# Altium footprint library WR-FPC_0.50mm.PcbLib: 147 footprints (part 1 of 10)
Each footprint in its own frame and in the unit in brackets; x right, y up, seen from the top. Pads: shape width x height; smd on the part's side, far side on the other; paste and mask are expansions set on the pad; w line width, h text height; cw(c..) or ccw(c..) is an arc to the next point about the centre after c.
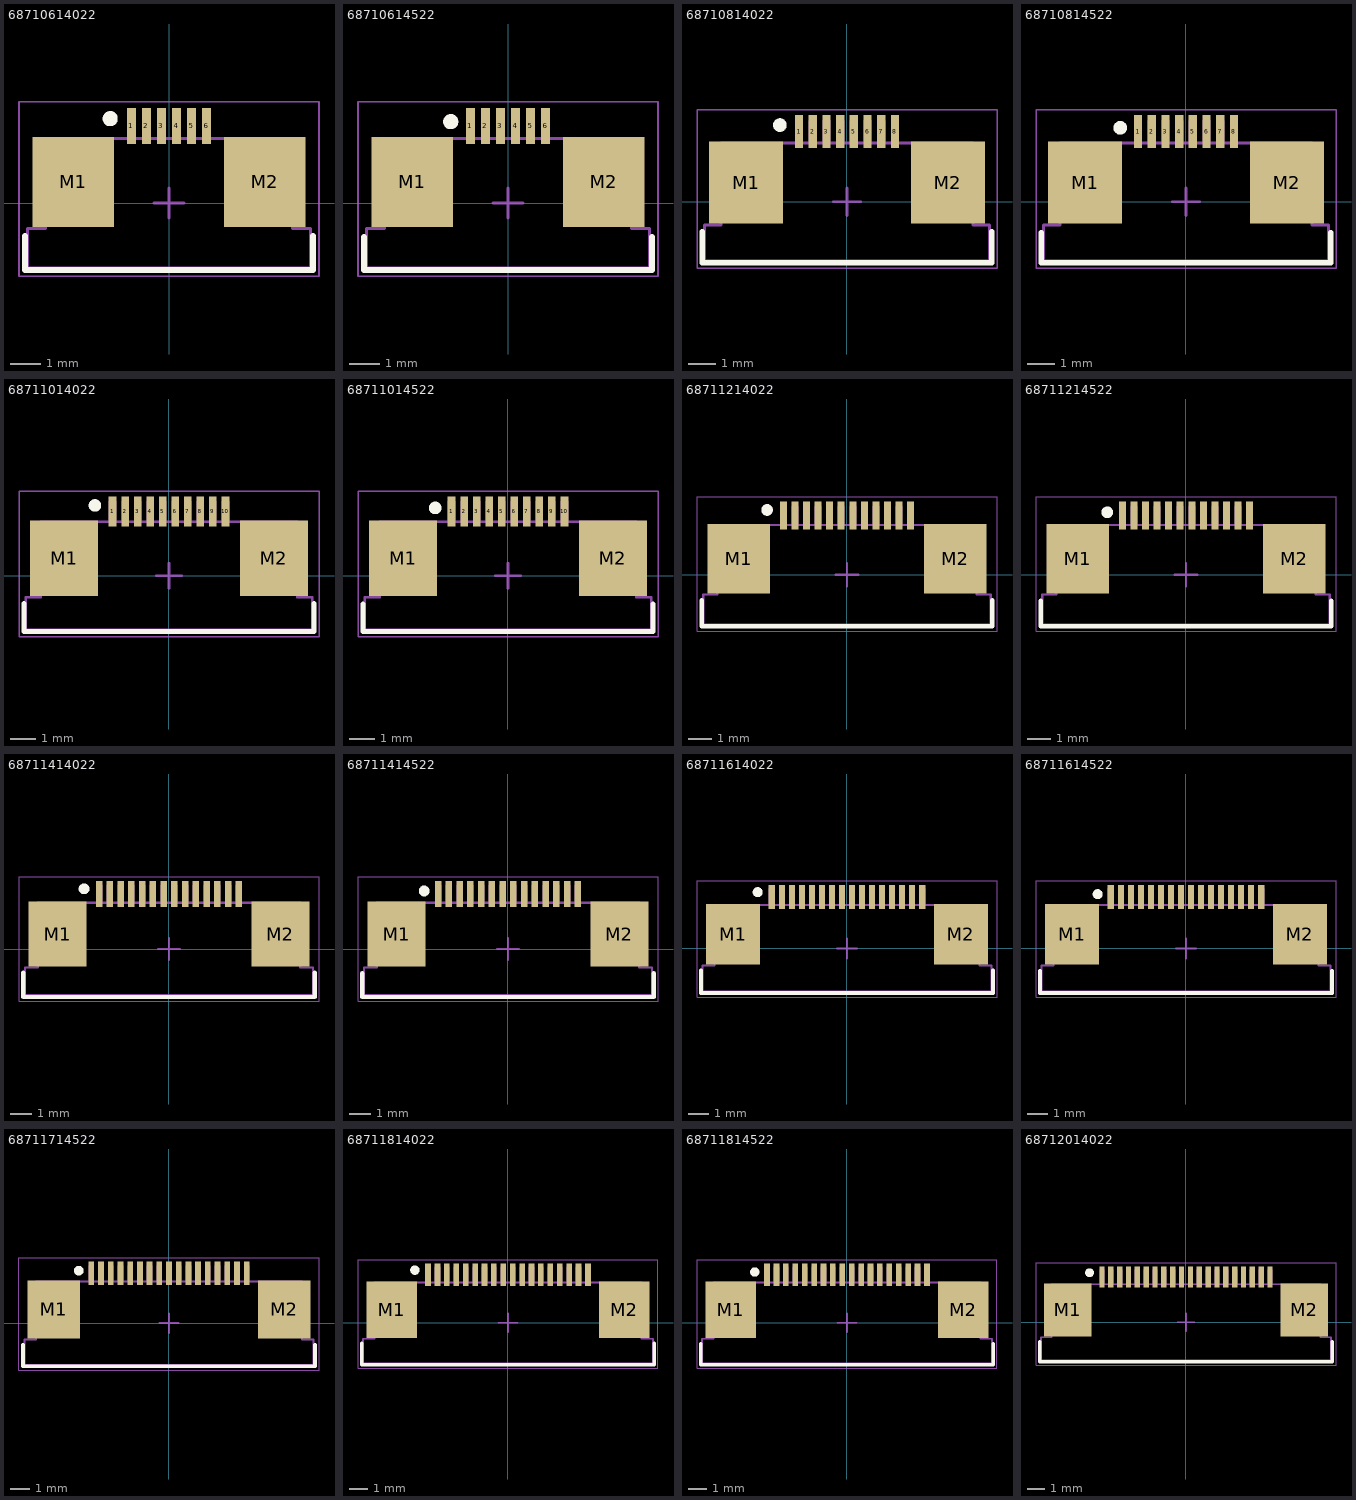
[diagram p0: the footprints below, top view; thin cyan lines are the x and y axes]

## 68710614022 [mm] "ZIF Connectors, Horizontal, Top Contact, pitch 0.5mm, 6p"
height 2.25
pads (8):
  rect 0.3x1.2 smd: 1(-1.25,2.56) 2(-0.75,2.56) 3(-0.25,2.56) 4(0.25,2.56) 5(0.75,2.56) 6(1.25,2.56)
  rect 2.7x3 smd: M1(-3.18,0.7) M2(3.18,0.7)
Top Overlay:
  circle w0.25: c-1.95,2.8 r0.125
  lines w0.2: -4.775,-1.1 -4.775,-2.225 4.775,-2.225 4.775,-1.1
Top Assembly:
  lines w0.1: -1.35,2.15 -1.35,2.95 -1.15,2.95 -1.15,2.15 ; -0.85,2.15 -0.85,2.95 -0.65,2.95 -0.65,2.15 ; -0.35,2.15 -0.35,2.95 -0.15,2.95 -0.15,2.15 ; 0.15,2.15 0.15,2.95 0.35,2.95 0.35,2.15 ; 0.65,2.15 0.65,2.95 0.85,2.95 0.85,2.15 ; 1.15,2.15 1.15,2.95 1.35,2.95 1.35,2.15 ; -4.7,-2.15 4.7,-2.15 4.7,-0.85 4.1,-0.85 4.1,2.15 -4.1,2.15 -4.1,-0.85 -4.7,-0.85 -4.7,-2.15
Top Designator:
  text ".Designator" at -3.647,-0.357 h1
Top 3D Body:
  lines w0.1: -1.35,2.15 -1.35,2.95 -1.15,2.95 -1.15,2.15 ; -0.85,2.15 -0.85,2.95 -0.65,2.95 -0.65,2.15 ; -0.35,2.15 -0.35,2.95 -0.15,2.95 -0.15,2.15 ; 0.15,2.15 0.15,2.95 0.35,2.95 0.35,2.15 ; 0.65,2.15 0.65,2.95 0.85,2.95 0.85,2.15 ; 1.15,2.15 1.15,2.95 1.35,2.95 1.35,2.15 ; -4.7,-2.15 -4.7,-0.85 -4.1,-0.85 -4.1,2.15 4.1,2.15 4.1,-0.85 4.7,-0.85 4.7,-2.15 -4.7,-2.15
Top Courtyard:
  lines w0.05: -4.975,-2.425 4.975,-2.425 4.975,3.36 -4.975,3.36 -4.975,-2.425
Top Component Center:
  lines w0.1: -0.5,0 0.5,0 ; 0,-0.5 0,0.5
3D body "68710614022.stp": height 2.1, standoff 0, extent -4.7,-2.15 4.7,2.95

## 68710614522 [mm] "ZIF Connectors, Horizontal, Bottom Contact, pitch 0.5mm, 6p"
height 2.25
pads (8):
  rect 0.3x1.2 smd: 1(-1.25,2.56) 2(-0.75,2.56) 3(-0.25,2.56) 4(0.25,2.56) 5(0.75,2.56) 6(1.25,2.56)
  rect 2.7x3 smd: M1(-3.18,0.7) M2(3.18,0.7)
Top Overlay:
  circle w0.25: c-1.9,2.7 r0.125
  lines w0.2: -4.775,-1.125 -4.775,-2.225 4.775,-2.225 4.775,-1.125
Top Assembly:
  lines w0.1: -1.35,2.15 -1.35,2.95 -1.15,2.95 -1.15,2.15 ; -0.85,2.15 -0.85,2.95 -0.65,2.95 -0.65,2.15 ; -0.35,2.15 -0.35,2.95 -0.15,2.95 -0.15,2.15 ; 0.15,2.15 0.15,2.95 0.35,2.95 0.35,2.15 ; 0.65,2.15 0.65,2.95 0.85,2.95 0.85,2.15 ; 1.15,2.15 1.15,2.95 1.35,2.95 1.35,2.15 ; -4.7,-2.15 -4.7,-0.85 -4.1,-0.85 -4.1,2.15 4.1,2.15 4.1,-0.85 4.7,-0.85 4.7,-2.15 -4.7,-2.15
Top Designator:
  text ".Designator" at -3.647,-0.357 h1
Top 3D Body:
  lines w0.1: -1.35,2.15 -1.35,2.95 -1.15,2.95 -1.15,2.15 ; -0.85,2.15 -0.85,2.95 -0.65,2.95 -0.65,2.15 ; -0.35,2.15 -0.35,2.95 -0.15,2.95 -0.15,2.15 ; 0.15,2.15 0.15,2.95 0.35,2.95 0.35,2.15 ; 0.65,2.15 0.65,2.95 0.85,2.95 0.85,2.15 ; 1.15,2.15 1.15,2.95 1.35,2.95 1.35,2.15 ; -4.7,-2.15 4.7,-2.15 4.7,-0.85 4.1,-0.85 4.1,2.15 -4.1,2.15 -4.1,-0.85 -4.7,-0.85 -4.7,-2.15
Top Courtyard:
  lines w0.05: -4.975,-2.425 4.975,-2.425 4.975,3.36 -4.975,3.36 -4.975,-2.425
Top Component Center:
  lines w0.1: -0.5,0 0.5,0 ; 0,-0.5 0,0.5
3D body "68710614522.stp": height 2.1, standoff 0, extent -4.7,-2.15 4.7,2.95

## 68710814022 [mm] "ZIF Connectors, Horizontal, Top Contact, pitch 0.5mm, 8p"
height 2.25
pads (10):
  rect 0.3x1.2 smd: 1(-1.75,2.56) 2(-1.25,2.56) 3(-0.75,2.56) 4(-0.25,2.56) 5(0.25,2.56) 6(0.75,2.56) 7(1.25,2.56) 8(1.75,2.56)
  rect 2.7x3 smd: M1(-3.68,0.7) M2(3.68,0.7)
Top Overlay:
  circle w0.25: c-2.45,2.8 r0.125
  lines w0.2: -5.275,-1.1 -5.275,-2.225 5.275,-2.225 5.275,-1.1
Top Assembly:
  lines w0.1: -1.85,2.15 -1.85,2.95 -1.65,2.95 -1.65,2.15 ; -1.35,2.15 -1.35,2.95 -1.15,2.95 -1.15,2.15 ; -0.85,2.15 -0.85,2.95 -0.65,2.95 -0.65,2.15 ; -0.35,2.15 -0.35,2.95 -0.15,2.95 -0.15,2.15 ; 0.15,2.15 0.15,2.95 0.35,2.95 0.35,2.15 ; 0.65,2.15 0.65,2.95 0.85,2.95 0.85,2.15 ; 1.15,2.15 1.15,2.95 1.35,2.95 1.35,2.15 ; 1.65,2.15 1.65,2.95 1.85,2.95 1.85,2.15 ; -5.2,-2.15 5.2,-2.15 5.2,-0.85 4.6,-0.85 4.6,2.15 -4.6,2.15 -4.6,-0.85 -5.2,-0.85 -5.2,-2.15
Top Designator:
  text ".Designator" at -3.647,-0.357 h1
Top 3D Body:
  lines w0.1: -1.85,2.15 -1.85,2.95 -1.65,2.95 -1.65,2.15 ; -1.35,2.15 -1.35,2.95 -1.15,2.95 -1.15,2.15 ; -0.85,2.15 -0.85,2.95 -0.65,2.95 -0.65,2.15 ; -0.35,2.15 -0.35,2.95 -0.15,2.95 -0.15,2.15 ; 0.15,2.15 0.15,2.95 0.35,2.95 0.35,2.15 ; 0.65,2.15 0.65,2.95 0.85,2.95 0.85,2.15 ; 1.15,2.15 1.15,2.95 1.35,2.95 1.35,2.15 ; 1.65,2.15 1.65,2.95 1.85,2.95 1.85,2.15 ; -5.2,-2.15 -5.2,-0.85 -4.6,-0.85 -4.6,2.15 4.6,2.15 4.6,-0.85 5.2,-0.85 5.2,-2.15 -5.2,-2.15
Top Courtyard:
  lines w0.05: -5.475,-2.425 5.475,-2.425 5.475,3.36 -5.475,3.36 -5.475,-2.425
Top Component Center:
  lines w0.1: -0.5,0 0.5,0 ; 0,-0.5 0,0.5
3D body "68710814022.stp": height 2.1, standoff 0, extent -5.2,-2.15 5.2,2.95

## 68710814522 [mm] "ZIF Connectors, Horizontal, Bottom Contact, pitch 0.5mm, 8p"
height 2.25
pads (10):
  rect 0.3x1.2 smd: 1(-1.75,2.56) 2(-1.25,2.56) 3(-0.75,2.56) 4(-0.25,2.56) 5(0.25,2.56) 6(0.75,2.56) 7(1.25,2.56) 8(1.75,2.56)
  rect 2.7x3 smd: M1(-3.68,0.7) M2(3.68,0.7)
Top Overlay:
  circle w0.25: c-2.4,2.7 r0.125
  lines w0.2: -5.275,-1.125 -5.275,-2.225 5.275,-2.225 5.275,-1.125
Top Assembly:
  lines w0.1: -1.85,2.15 -1.85,2.95 -1.65,2.95 -1.65,2.15 ; -1.35,2.15 -1.35,2.95 -1.15,2.95 -1.15,2.15 ; -0.85,2.15 -0.85,2.95 -0.65,2.95 -0.65,2.15 ; -0.35,2.15 -0.35,2.95 -0.15,2.95 -0.15,2.15 ; 0.15,2.15 0.15,2.95 0.35,2.95 0.35,2.15 ; 0.65,2.15 0.65,2.95 0.85,2.95 0.85,2.15 ; 1.15,2.15 1.15,2.95 1.35,2.95 1.35,2.15 ; 1.65,2.15 1.65,2.95 1.85,2.95 1.85,2.15 ; -5.2,-2.15 -5.2,-0.85 -4.6,-0.85 -4.6,2.15 4.6,2.15 4.6,-0.85 5.2,-0.85 5.2,-2.15 -5.2,-2.15
Top Designator:
  text ".Designator" at -3.647,-0.357 h1
Top 3D Body:
  lines w0.1: -1.85,2.15 -1.85,2.95 -1.65,2.95 -1.65,2.15 ; -1.35,2.15 -1.35,2.95 -1.15,2.95 -1.15,2.15 ; -0.85,2.15 -0.85,2.95 -0.65,2.95 -0.65,2.15 ; -0.35,2.15 -0.35,2.95 -0.15,2.95 -0.15,2.15 ; 0.15,2.15 0.15,2.95 0.35,2.95 0.35,2.15 ; 0.65,2.15 0.65,2.95 0.85,2.95 0.85,2.15 ; 1.15,2.15 1.15,2.95 1.35,2.95 1.35,2.15 ; 1.65,2.15 1.65,2.95 1.85,2.95 1.85,2.15 ; -5.2,-2.15 5.2,-2.15 5.2,-0.85 4.6,-0.85 4.6,2.15 -4.6,2.15 -4.6,-0.85 -5.2,-0.85 -5.2,-2.15
Top Courtyard:
  lines w0.05: -5.475,-2.425 5.475,-2.425 5.475,3.36 -5.475,3.36 -5.475,-2.425
Top Component Center:
  lines w0.1: -0.5,0 0.5,0 ; 0,-0.5 0,0.5
3D body "68710814522.stp": height 2.1, standoff 0, extent -5.2,-2.15 5.2,2.95

## 68711014022 [mm] "ZIF Connectors, Horizontal, Top Contact, pitch 0.5mm, 10p"
height 2.25
pads (12):
  rect 0.3x1.2 smd: 1(-2.25,2.56) 2(-1.75,2.56) 3(-1.25,2.56) 4(-0.75,2.56) 5(-0.25,2.56) 6(0.25,2.56) 7(0.75,2.56) 8(1.25,2.56) 9(1.75,2.56) 10(2.25,2.56)
  rect 2.7x3 smd: M1(-4.18,0.7) M2(4.18,0.7)
Top Overlay:
  circle w0.25: c-2.95,2.8 r0.125
  lines w0.2: -5.775,-1.1 -5.775,-2.225 5.775,-2.225 5.775,-1.1
Top Assembly:
  lines w0.1: -2.35,2.15 -2.35,2.95 -2.15,2.95 -2.15,2.15 ; -1.85,2.15 -1.85,2.95 -1.65,2.95 -1.65,2.15 ; -1.35,2.15 -1.35,2.95 -1.15,2.95 -1.15,2.15 ; -0.85,2.15 -0.85,2.95 -0.65,2.95 -0.65,2.15 ; -0.35,2.15 -0.35,2.95 -0.15,2.95 -0.15,2.15 ; 0.15,2.15 0.15,2.95 0.35,2.95 0.35,2.15 ; 0.65,2.15 0.65,2.95 0.85,2.95 0.85,2.15 ; 1.15,2.15 1.15,2.95 1.35,2.95 1.35,2.15 ; 1.65,2.15 1.65,2.95 1.85,2.95 1.85,2.15 ; 2.15,2.15 2.15,2.95 2.35,2.95 2.35,2.15 ; -5.7,-2.15 -5.7,-0.85 -5.1,-0.85 -5.1,2.15 5.1,2.15 5.1,-0.85 5.7,-0.85 5.7,-2.15 -5.7,-2.15
Top Designator:
  text ".Designator" at -3.647,-0.357 h1
Top 3D Body:
  lines w0.1: -2.35,2.15 -2.35,2.95 -2.15,2.95 -2.15,2.15 ; -1.85,2.15 -1.85,2.95 -1.65,2.95 -1.65,2.15 ; -1.35,2.15 -1.35,2.95 -1.15,2.95 -1.15,2.15 ; -0.85,2.15 -0.85,2.95 -0.65,2.95 -0.65,2.15 ; -0.35,2.15 -0.35,2.95 -0.15,2.95 -0.15,2.15 ; 0.15,2.15 0.15,2.95 0.35,2.95 0.35,2.15 ; 0.65,2.15 0.65,2.95 0.85,2.95 0.85,2.15 ; 1.15,2.15 1.15,2.95 1.35,2.95 1.35,2.15 ; 1.65,2.15 1.65,2.95 1.85,2.95 1.85,2.15 ; 2.15,2.15 2.15,2.95 2.35,2.95 2.35,2.15 ; -5.7,-2.15 5.7,-2.15 5.7,-0.85 5.1,-0.85 5.1,2.15 -5.1,2.15 -5.1,-0.85 -5.7,-0.85 -5.7,-2.15
Top Courtyard:
  lines w0.05: -5.975,-2.425 -5.975,3.36 5.975,3.36 5.975,-2.425 -5.975,-2.425
Top Component Center:
  lines w0.1: -0.5,0 0.5,0 ; 0,-0.5 0,0.5
3D body "68711014022.stp": height 2.1, standoff 0, extent -5.7,-2.15 5.7,2.95

## 68711014522 [mm] "ZIF Connectors, Horizontal, Bottom Contact, pitch 0.5mm, 10p"
height 2.25
pads (12):
  rect 0.3x1.2 smd: 1(-2.25,2.56) 2(-1.75,2.56) 3(-1.25,2.56) 4(-0.75,2.56) 5(-0.25,2.56) 6(0.25,2.56) 7(0.75,2.56) 8(1.25,2.56) 9(1.75,2.56) 10(2.25,2.56)
  rect 2.7x3 smd: M1(-4.18,0.7) M2(4.18,0.7)
Top Overlay:
  circle w0.25: c-2.9,2.7 r0.125
  lines w0.2: -5.775,-1.125 -5.775,-2.225 5.775,-2.225 5.775,-1.125
Top Assembly:
  lines w0.1: -2.35,2.15 -2.35,2.95 -2.15,2.95 -2.15,2.15 ; -1.85,2.15 -1.85,2.95 -1.65,2.95 -1.65,2.15 ; -1.35,2.15 -1.35,2.95 -1.15,2.95 -1.15,2.15 ; -0.85,2.15 -0.85,2.95 -0.65,2.95 -0.65,2.15 ; -0.35,2.15 -0.35,2.95 -0.15,2.95 -0.15,2.15 ; 0.15,2.15 0.15,2.95 0.35,2.95 0.35,2.15 ; 0.65,2.15 0.65,2.95 0.85,2.95 0.85,2.15 ; 1.15,2.15 1.15,2.95 1.35,2.95 1.35,2.15 ; 1.65,2.15 1.65,2.95 1.85,2.95 1.85,2.15 ; 2.15,2.15 2.15,2.95 2.35,2.95 2.35,2.15 ; -5.7,-2.15 -5.7,-0.85 -5.1,-0.85 -5.1,2.15 5.1,2.15 5.1,-0.85 5.7,-0.85 5.7,-2.15 -5.7,-2.15
Top Designator:
  text ".Designator" at -3.647,-0.357 h1
Top 3D Body:
  lines w0.1: -2.35,2.15 -2.35,2.95 -2.15,2.95 -2.15,2.15 ; -1.85,2.15 -1.85,2.95 -1.65,2.95 -1.65,2.15 ; -1.35,2.15 -1.35,2.95 -1.15,2.95 -1.15,2.15 ; -0.85,2.15 -0.85,2.95 -0.65,2.95 -0.65,2.15 ; -0.35,2.15 -0.35,2.95 -0.15,2.95 -0.15,2.15 ; 0.15,2.15 0.15,2.95 0.35,2.95 0.35,2.15 ; 0.65,2.15 0.65,2.95 0.85,2.95 0.85,2.15 ; 1.15,2.15 1.15,2.95 1.35,2.95 1.35,2.15 ; 1.65,2.15 1.65,2.95 1.85,2.95 1.85,2.15 ; 2.15,2.15 2.15,2.95 2.35,2.95 2.35,2.15 ; -5.7,-2.15 5.7,-2.15 5.7,-0.85 5.1,-0.85 5.1,2.15 -5.1,2.15 -5.1,-0.85 -5.7,-0.85 -5.7,-2.15
Top Courtyard:
  lines w0.05: -5.975,-2.425 5.975,-2.425 5.975,3.36 -5.975,3.36 -5.975,-2.425
Top Component Center:
  lines w0.1: -0.5,0 0.5,0 ; 0,-0.5 0,0.5
3D body "68711014522.stp": height 2.1, standoff 0, extent -5.7,-2.15 5.7,2.95

## 68711214022 [mm] "ZIF Connectors, Horizontal, Top Contact, pitch 0.5mm, 12p"
height 2.25
pads (14):
  rect 0.3x1.2 smd: 1(-2.75,2.56) 2(-2.25,2.56) 3(-1.75,2.56) 4(-1.25,2.56) 5(-0.75,2.56) 6(-0.25,2.56) 7(0.25,2.56) 8(0.75,2.56) 9(1.25,2.56) 10(1.75,2.56) 11(2.25,2.56) 12(2.75,2.56)
  rect 2.7x3 smd: M1(-4.68,0.7) M2(4.68,0.7)
Top Overlay:
  circle w0.25: c-3.45,2.8 r0.125
  lines w0.2: -6.275,-1.1 -6.275,-2.225 6.275,-2.225 6.275,-1.1
Top Assembly:
  lines w0.1: -2.85,2.15 -2.85,2.95 -2.65,2.95 -2.65,2.15 ; -2.35,2.15 -2.35,2.95 -2.15,2.95 -2.15,2.15 ; -1.85,2.15 -1.85,2.95 -1.65,2.95 -1.65,2.15 ; -1.35,2.15 -1.35,2.95 -1.15,2.95 -1.15,2.15 ; -0.85,2.15 -0.85,2.95 -0.65,2.95 -0.65,2.15 ; -0.35,2.15 -0.35,2.95 -0.15,2.95 -0.15,2.15 ; 0.15,2.15 0.15,2.95 0.35,2.95 0.35,2.15 ; 0.65,2.15 0.65,2.95 0.85,2.95 0.85,2.15 ; 1.15,2.15 1.15,2.95 1.35,2.95 1.35,2.15 ; 1.65,2.15 1.65,2.95 1.85,2.95 1.85,2.15 ; 2.15,2.15 2.15,2.95 2.35,2.95 2.35,2.15 ; 2.65,2.15 2.65,2.95 2.85,2.95 2.85,2.15 ; -6.2,-2.15 6.2,-2.15 6.2,-0.85 5.6,-0.85 5.6,2.15 -5.6,2.15 -5.6,-0.85 -6.2,-0.85 -6.2,-2.15
Top Designator:
  text ".Designator" at -3.647,-0.357 h1
Top 3D Body:
  lines w0.1: -2.85,2.15 -2.85,2.95 -2.65,2.95 -2.65,2.15 ; -2.35,2.15 -2.35,2.95 -2.15,2.95 -2.15,2.15 ; -1.85,2.15 -1.85,2.95 -1.65,2.95 -1.65,2.15 ; -1.35,2.15 -1.35,2.95 -1.15,2.95 -1.15,2.15 ; -0.85,2.15 -0.85,2.95 -0.65,2.95 -0.65,2.15 ; -0.35,2.15 -0.35,2.95 -0.15,2.95 -0.15,2.15 ; 0.15,2.15 0.15,2.95 0.35,2.95 0.35,2.15 ; 0.65,2.15 0.65,2.95 0.85,2.95 0.85,2.15 ; 1.15,2.15 1.15,2.95 1.35,2.95 1.35,2.15 ; 1.65,2.15 1.65,2.95 1.85,2.95 1.85,2.15 ; 2.15,2.15 2.15,2.95 2.35,2.95 2.35,2.15 ; 2.65,2.15 2.65,2.95 2.85,2.95 2.85,2.15 ; -6.2,-2.15 -6.2,-0.85 -5.6,-0.85 -5.6,2.15 5.6,2.15 5.6,-0.85 6.2,-0.85 6.2,-2.15 -6.2,-2.15
Top Courtyard:
  lines w0.05: -6.475,-2.425 6.475,-2.425 6.475,3.36 -6.475,3.36 -6.475,-2.425
Top Component Center:
  lines w0.1: -0.5,0 0.5,0 ; 0,-0.5 0,0.5
3D body "68711214022.stp": height 2.1, standoff 0, extent -6.2,-2.15 6.2,2.95

## 68711214522 [mm] "ZIF Connectors, Horizontal, Bottom Contact, pitch 0.5mm, 12p"
height 2.25
pads (14):
  rect 0.3x1.2 smd: 1(-2.75,2.56) 2(-2.25,2.56) 3(-1.75,2.56) 4(-1.25,2.56) 5(-0.75,2.56) 6(-0.25,2.56) 7(0.25,2.56) 8(0.75,2.56) 9(1.25,2.56) 10(1.75,2.56) 11(2.25,2.56) 12(2.75,2.56)
  rect 2.7x3 smd: M1(-4.68,0.7) M2(4.68,0.7)
Top Overlay:
  circle w0.25: c-3.4,2.7 r0.125
  lines w0.2: -6.275,-1.125 -6.275,-2.225 6.275,-2.225 6.275,-1.125
Top Assembly:
  lines w0.1: -2.85,2.15 -2.85,2.95 -2.65,2.95 -2.65,2.15 ; -2.35,2.15 -2.35,2.95 -2.15,2.95 -2.15,2.15 ; -1.85,2.15 -1.85,2.95 -1.65,2.95 -1.65,2.15 ; -1.35,2.15 -1.35,2.95 -1.15,2.95 -1.15,2.15 ; -0.85,2.15 -0.85,2.95 -0.65,2.95 -0.65,2.15 ; -0.35,2.15 -0.35,2.95 -0.15,2.95 -0.15,2.15 ; 0.15,2.15 0.15,2.95 0.35,2.95 0.35,2.15 ; 0.65,2.15 0.65,2.95 0.85,2.95 0.85,2.15 ; 1.15,2.15 1.15,2.95 1.35,2.95 1.35,2.15 ; 1.65,2.15 1.65,2.95 1.85,2.95 1.85,2.15 ; 2.15,2.15 2.15,2.95 2.35,2.95 2.35,2.15 ; 2.65,2.15 2.65,2.95 2.85,2.95 2.85,2.15 ; -6.2,-2.15 6.2,-2.15 6.2,-0.85 5.6,-0.85 5.6,2.15 -5.6,2.15 -5.6,-0.85 -6.2,-0.85 -6.2,-2.15
Top Designator:
  text ".Designator" at -3.647,-0.357 h1
Top 3D Body:
  lines w0.1: -2.85,2.15 -2.85,2.95 -2.65,2.95 -2.65,2.15 ; -2.35,2.15 -2.35,2.95 -2.15,2.95 -2.15,2.15 ; -1.85,2.15 -1.85,2.95 -1.65,2.95 -1.65,2.15 ; -1.35,2.15 -1.35,2.95 -1.15,2.95 -1.15,2.15 ; -0.85,2.15 -0.85,2.95 -0.65,2.95 -0.65,2.15 ; -0.35,2.15 -0.35,2.95 -0.15,2.95 -0.15,2.15 ; 0.15,2.15 0.15,2.95 0.35,2.95 0.35,2.15 ; 0.65,2.15 0.65,2.95 0.85,2.95 0.85,2.15 ; 1.15,2.15 1.15,2.95 1.35,2.95 1.35,2.15 ; 1.65,2.15 1.65,2.95 1.85,2.95 1.85,2.15 ; 2.15,2.15 2.15,2.95 2.35,2.95 2.35,2.15 ; 2.65,2.15 2.65,2.95 2.85,2.95 2.85,2.15 ; -6.2,-2.15 -6.2,-0.85 -5.6,-0.85 -5.6,2.15 5.6,2.15 5.6,-0.85 6.2,-0.85 6.2,-2.15 -6.2,-2.15
Top Courtyard:
  lines w0.05: -6.475,-2.425 -6.475,3.36 6.475,3.36 6.475,-2.425 -6.475,-2.425
Top Component Center:
  lines w0.1: -0.5,0 0.5,0 ; 0,-0.5 0,0.5
3D body "68711214522.stp": height 2.1, standoff 0, extent -6.2,-2.15 6.2,2.95

## 68711414022 [mm] "ZIF Connectors, Horizontal, Top Contact, pitch 0.5mm, 14p"
height 2.25
pads (16):
  rect 0.3x1.2 smd: 1(-3.25,2.56) 2(-2.75,2.56) 3(-2.25,2.56) 4(-1.75,2.56) 5(-1.25,2.56) 6(-0.75,2.56) 7(-0.25,2.56) 8(0.25,2.56) 9(0.75,2.56) 10(1.25,2.56) 11(1.75,2.56) 12(2.25,2.56) 13(2.75,2.56) 14(3.25,2.56)
  rect 2.7x3 smd: M1(-5.18,0.7) M2(5.18,0.7)
Top Overlay:
  circle w0.25: c-3.95,2.8 r0.125
  lines w0.2: -6.775,-1.1 -6.775,-2.225 6.775,-2.225 6.775,-1.1
Top Assembly:
  lines w0.1: -3.35,2.15 -3.35,2.95 -3.15,2.95 -3.15,2.15 ; -2.85,2.15 -2.85,2.95 -2.65,2.95 -2.65,2.15 ; -2.35,2.15 -2.35,2.95 -2.15,2.95 -2.15,2.15 ; -1.85,2.15 -1.85,2.95 -1.65,2.95 -1.65,2.15 ; -1.35,2.15 -1.35,2.95 -1.15,2.95 -1.15,2.15 ; -0.85,2.15 -0.85,2.95 -0.65,2.95 -0.65,2.15 ; -0.35,2.15 -0.35,2.95 -0.15,2.95 -0.15,2.15 ; 0.15,2.15 0.15,2.95 0.35,2.95 0.35,2.15 ; 0.65,2.15 0.65,2.95 0.85,2.95 0.85,2.15 ; 1.15,2.15 1.15,2.95 1.35,2.95 1.35,2.15 ; 1.65,2.15 1.65,2.95 1.85,2.95 1.85,2.15 ; 2.15,2.15 2.15,2.95 2.35,2.95 2.35,2.15 ; 2.65,2.15 2.65,2.95 2.85,2.95 2.85,2.15 ; 3.15,2.15 3.15,2.95 3.35,2.95 3.35,2.15 ; -6.7,-2.15 -6.7,-0.85 -6.1,-0.85 -6.1,2.15 6.1,2.15 6.1,-0.85 6.7,-0.85 6.7,-2.15 -6.7,-2.15
Top Designator:
  text ".Designator" at -3.647,-0.357 h1
Top 3D Body:
  lines w0.1: -3.35,2.15 -3.35,2.95 -3.15,2.95 -3.15,2.15 ; -2.85,2.15 -2.85,2.95 -2.65,2.95 -2.65,2.15 ; -2.35,2.15 -2.35,2.95 -2.15,2.95 -2.15,2.15 ; -1.85,2.15 -1.85,2.95 -1.65,2.95 -1.65,2.15 ; -1.35,2.15 -1.35,2.95 -1.15,2.95 -1.15,2.15 ; -0.85,2.15 -0.85,2.95 -0.65,2.95 -0.65,2.15 ; -0.35,2.15 -0.35,2.95 -0.15,2.95 -0.15,2.15 ; 0.15,2.15 0.15,2.95 0.35,2.95 0.35,2.15 ; 0.65,2.15 0.65,2.95 0.85,2.95 0.85,2.15 ; 1.15,2.15 1.15,2.95 1.35,2.95 1.35,2.15 ; 1.65,2.15 1.65,2.95 1.85,2.95 1.85,2.15 ; 2.15,2.15 2.15,2.95 2.35,2.95 2.35,2.15 ; 2.65,2.15 2.65,2.95 2.85,2.95 2.85,2.15 ; 3.15,2.15 3.15,2.95 3.35,2.95 3.35,2.15 ; -6.7,-2.15 6.7,-2.15 6.7,-0.85 6.1,-0.85 6.1,2.15 -6.1,2.15 -6.1,-0.85 -6.7,-0.85 -6.7,-2.15
Top Courtyard:
  lines w0.05: -6.975,-2.425 -6.975,3.36 6.975,3.36 6.975,-2.425 -6.975,-2.425
Top Component Center:
  lines w0.1: -0.5,0 0.5,0 ; 0,-0.5 0,0.5
3D body "68711414022.stp": height 2.1, standoff 0, extent -6.7,-2.15 6.7,2.95

## 68711414522 [mm] "ZIF Connectors, Horizontal, Bottom Contact, pitch 0.5mm, 14p"
height 2.25
pads (16):
  rect 0.3x1.2 smd: 1(-3.25,2.56) 2(-2.75,2.56) 3(-2.25,2.56) 4(-1.75,2.56) 5(-1.25,2.56) 6(-0.75,2.56) 7(-0.25,2.56) 8(0.25,2.56) 9(0.75,2.56) 10(1.25,2.56) 11(1.75,2.56) 12(2.25,2.56) 13(2.75,2.56) 14(3.25,2.56)
  rect 2.7x3 smd: M1(-5.18,0.7) M2(5.18,0.7)
Top Overlay:
  circle w0.25: c-3.9,2.7 r0.125
  lines w0.2: -6.775,-1.125 -6.775,-2.225 6.775,-2.225 6.775,-1.125
Top Assembly:
  lines w0.1: -3.35,2.15 -3.35,2.95 -3.15,2.95 -3.15,2.15 ; -2.85,2.15 -2.85,2.95 -2.65,2.95 -2.65,2.15 ; -2.35,2.15 -2.35,2.95 -2.15,2.95 -2.15,2.15 ; -1.85,2.15 -1.85,2.95 -1.65,2.95 -1.65,2.15 ; -1.35,2.15 -1.35,2.95 -1.15,2.95 -1.15,2.15 ; -0.85,2.15 -0.85,2.95 -0.65,2.95 -0.65,2.15 ; -0.35,2.15 -0.35,2.95 -0.15,2.95 -0.15,2.15 ; 0.15,2.15 0.15,2.95 0.35,2.95 0.35,2.15 ; 0.65,2.15 0.65,2.95 0.85,2.95 0.85,2.15 ; 1.15,2.15 1.15,2.95 1.35,2.95 1.35,2.15 ; 1.65,2.15 1.65,2.95 1.85,2.95 1.85,2.15 ; 2.15,2.15 2.15,2.95 2.35,2.95 2.35,2.15 ; 2.65,2.15 2.65,2.95 2.85,2.95 2.85,2.15 ; 3.15,2.15 3.15,2.95 3.35,2.95 3.35,2.15 ; -6.7,-2.15 -6.7,-0.85 -6.1,-0.85 -6.1,2.15 6.1,2.15 6.1,-0.85 6.7,-0.85 6.7,-2.15 -6.7,-2.15
Top Designator:
  text ".Designator" at -3.647,-0.357 h1
Top 3D Body:
  lines w0.1: -3.35,2.15 -3.35,2.95 -3.15,2.95 -3.15,2.15 ; -2.85,2.15 -2.85,2.95 -2.65,2.95 -2.65,2.15 ; -2.35,2.15 -2.35,2.95 -2.15,2.95 -2.15,2.15 ; -1.85,2.15 -1.85,2.95 -1.65,2.95 -1.65,2.15 ; -1.35,2.15 -1.35,2.95 -1.15,2.95 -1.15,2.15 ; -0.85,2.15 -0.85,2.95 -0.65,2.95 -0.65,2.15 ; -0.35,2.15 -0.35,2.95 -0.15,2.95 -0.15,2.15 ; 0.15,2.15 0.15,2.95 0.35,2.95 0.35,2.15 ; 0.65,2.15 0.65,2.95 0.85,2.95 0.85,2.15 ; 1.15,2.15 1.15,2.95 1.35,2.95 1.35,2.15 ; 1.65,2.15 1.65,2.95 1.85,2.95 1.85,2.15 ; 2.15,2.15 2.15,2.95 2.35,2.95 2.35,2.15 ; 2.65,2.15 2.65,2.95 2.85,2.95 2.85,2.15 ; 3.15,2.15 3.15,2.95 3.35,2.95 3.35,2.15 ; -6.7,-2.15 6.7,-2.15 6.7,-0.85 6.1,-0.85 6.1,2.15 -6.1,2.15 -6.1,-0.85 -6.7,-0.85 -6.7,-2.15
Top Courtyard:
  lines w0.05: -6.975,-2.425 6.975,-2.425 6.975,3.36 -6.975,3.36 -6.975,-2.425
Top Component Center:
  lines w0.1: -0.5,0 0.5,0 ; 0,-0.5 0,0.5
3D body "68711414522.stp": height 2.1, standoff 0, extent -6.7,-2.15 6.7,2.95

## 68711614022 [mm] "ZIF Connectors, Horizontal, Top Contact, pitch 0.5mm, 16p"
height 2.25
pads (18):
  rect 0.3x1.2 smd: 1(-3.75,2.56) 2(-3.25,2.56) 3(-2.75,2.56) 4(-2.25,2.56) 5(-1.75,2.56) 6(-1.25,2.56) 7(-0.75,2.56) 8(-0.25,2.56) 9(0.25,2.56) 10(0.75,2.56) 11(1.25,2.56) 12(1.75,2.56) 13(2.25,2.56) 14(2.75,2.56) 15(3.25,2.56) 16(3.75,2.56)
  rect 2.7x3 smd: M1(-5.68,0.7) M2(5.68,0.7)
Top Overlay:
  circle w0.25: c-4.45,2.8 r0.125
  lines w0.2: -7.275,-1.1 -7.275,-2.225 7.275,-2.225 7.275,-1.1
Top Assembly:
  lines w0.1: -3.85,2.15 -3.85,2.95 -3.65,2.95 -3.65,2.15 ; -3.35,2.15 -3.35,2.95 -3.15,2.95 -3.15,2.15 ; -2.85,2.15 -2.85,2.95 -2.65,2.95 -2.65,2.15 ; -2.35,2.15 -2.35,2.95 -2.15,2.95 -2.15,2.15 ; -1.85,2.15 -1.85,2.95 -1.65,2.95 -1.65,2.15 ; -1.35,2.15 -1.35,2.95 -1.15,2.95 -1.15,2.15 ; -0.85,2.15 -0.85,2.95 -0.65,2.95 -0.65,2.15 ; -0.35,2.15 -0.35,2.95 -0.15,2.95 -0.15,2.15 ; 0.15,2.15 0.15,2.95 0.35,2.95 0.35,2.15 ; 0.65,2.15 0.65,2.95 0.85,2.95 0.85,2.15 ; 1.15,2.15 1.15,2.95 1.35,2.95 1.35,2.15 ; 1.65,2.15 1.65,2.95 1.85,2.95 1.85,2.15 ; 2.15,2.15 2.15,2.95 2.35,2.95 2.35,2.15 ; 2.65,2.15 2.65,2.95 2.85,2.95 2.85,2.15 ; 3.15,2.15 3.15,2.95 3.35,2.95 3.35,2.15 ; 3.65,2.15 3.65,2.95 3.85,2.95 3.85,2.15 ; -7.2,-2.15 7.2,-2.15 7.2,-0.85 6.6,-0.85 6.6,2.15 -6.6,2.15 -6.6,-0.85 -7.2,-0.85 -7.2,-2.15
Top Designator:
  text ".Designator" at -3.647,-0.357 h1
Top 3D Body:
  lines w0.1: -3.85,2.15 -3.85,2.95 -3.65,2.95 -3.65,2.15 ; -3.35,2.15 -3.35,2.95 -3.15,2.95 -3.15,2.15 ; -2.85,2.15 -2.85,2.95 -2.65,2.95 -2.65,2.15 ; -2.35,2.15 -2.35,2.95 -2.15,2.95 -2.15,2.15 ; -1.85,2.15 -1.85,2.95 -1.65,2.95 -1.65,2.15 ; -1.35,2.15 -1.35,2.95 -1.15,2.95 -1.15,2.15 ; -0.85,2.15 -0.85,2.95 -0.65,2.95 -0.65,2.15 ; -0.35,2.15 -0.35,2.95 -0.15,2.95 -0.15,2.15 ; 0.15,2.15 0.15,2.95 0.35,2.95 0.35,2.15 ; 0.65,2.15 0.65,2.95 0.85,2.95 0.85,2.15 ; 1.15,2.15 1.15,2.95 1.35,2.95 1.35,2.15 ; 1.65,2.15 1.65,2.95 1.85,2.95 1.85,2.15 ; 2.15,2.15 2.15,2.95 2.35,2.95 2.35,2.15 ; 2.65,2.15 2.65,2.95 2.85,2.95 2.85,2.15 ; 3.15,2.15 3.15,2.95 3.35,2.95 3.35,2.15 ; 3.65,2.15 3.65,2.95 3.85,2.95 3.85,2.15 ; -7.2,-2.15 -7.2,-0.85 -6.6,-0.85 -6.6,2.15 6.6,2.15 6.6,-0.85 7.2,-0.85 7.2,-2.15 -7.2,-2.15
Top Courtyard:
  lines w0.05: -7.475,-2.425 7.475,-2.425 7.475,3.36 -7.475,3.36 -7.475,-2.425
Top Component Center:
  lines w0.1: -0.5,0 0.5,0 ; 0,-0.5 0,0.5
3D body "68711614022.stp": height 2.1, standoff 0, extent -7.2,-2.15 7.2,2.95

## 68711614522 [mm] "ZIF Connectors, Horizontal, Bottom Contact, pitch 0.5mm, 16p"
height 2.25
pads (18):
  rect 0.3x1.2 smd: 1(-3.75,2.56) 2(-3.25,2.56) 3(-2.75,2.56) 4(-2.25,2.56) 5(-1.75,2.56) 6(-1.25,2.56) 7(-0.75,2.56) 8(-0.25,2.56) 9(0.25,2.56) 10(0.75,2.56) 11(1.25,2.56) 12(1.75,2.56) 13(2.25,2.56) 14(2.75,2.56) 15(3.25,2.56) 16(3.75,2.56)
  rect 2.7x3 smd: M1(-5.68,0.7) M2(5.68,0.7)
Top Overlay:
  circle w0.25: c-4.4,2.7 r0.125
  lines w0.2: -7.275,-1.125 -7.275,-2.225 7.275,-2.225 7.275,-1.125
Top Assembly:
  lines w0.1: -3.85,2.15 -3.85,2.95 -3.65,2.95 -3.65,2.15 ; -3.35,2.15 -3.35,2.95 -3.15,2.95 -3.15,2.15 ; -2.85,2.15 -2.85,2.95 -2.65,2.95 -2.65,2.15 ; -2.35,2.15 -2.35,2.95 -2.15,2.95 -2.15,2.15 ; -1.85,2.15 -1.85,2.95 -1.65,2.95 -1.65,2.15 ; -1.35,2.15 -1.35,2.95 -1.15,2.95 -1.15,2.15 ; -0.85,2.15 -0.85,2.95 -0.65,2.95 -0.65,2.15 ; -0.35,2.15 -0.35,2.95 -0.15,2.95 -0.15,2.15 ; 0.15,2.15 0.15,2.95 0.35,2.95 0.35,2.15 ; 0.65,2.15 0.65,2.95 0.85,2.95 0.85,2.15 ; 1.15,2.15 1.15,2.95 1.35,2.95 1.35,2.15 ; 1.65,2.15 1.65,2.95 1.85,2.95 1.85,2.15 ; 2.15,2.15 2.15,2.95 2.35,2.95 2.35,2.15 ; 2.65,2.15 2.65,2.95 2.85,2.95 2.85,2.15 ; 3.15,2.15 3.15,2.95 3.35,2.95 3.35,2.15 ; 3.65,2.15 3.65,2.95 3.85,2.95 3.85,2.15 ; -7.2,-2.15 7.2,-2.15 7.2,-0.85 6.6,-0.85 6.6,2.15 -6.6,2.15 -6.6,-0.85 -7.2,-0.85 -7.2,-2.15
Top Designator:
  text ".Designator" at -3.647,-0.357 h1
Top 3D Body:
  lines w0.1: -3.85,2.15 -3.85,2.95 -3.65,2.95 -3.65,2.15 ; -3.35,2.15 -3.35,2.95 -3.15,2.95 -3.15,2.15 ; -2.85,2.15 -2.85,2.95 -2.65,2.95 -2.65,2.15 ; -2.35,2.15 -2.35,2.95 -2.15,2.95 -2.15,2.15 ; -1.85,2.15 -1.85,2.95 -1.65,2.95 -1.65,2.15 ; -1.35,2.15 -1.35,2.95 -1.15,2.95 -1.15,2.15 ; -0.85,2.15 -0.85,2.95 -0.65,2.95 -0.65,2.15 ; -0.35,2.15 -0.35,2.95 -0.15,2.95 -0.15,2.15 ; 0.15,2.15 0.15,2.95 0.35,2.95 0.35,2.15 ; 0.65,2.15 0.65,2.95 0.85,2.95 0.85,2.15 ; 1.15,2.15 1.15,2.95 1.35,2.95 1.35,2.15 ; 1.65,2.15 1.65,2.95 1.85,2.95 1.85,2.15 ; 2.15,2.15 2.15,2.95 2.35,2.95 2.35,2.15 ; 2.65,2.15 2.65,2.95 2.85,2.95 2.85,2.15 ; 3.15,2.15 3.15,2.95 3.35,2.95 3.35,2.15 ; 3.65,2.15 3.65,2.95 3.85,2.95 3.85,2.15 ; -7.2,-2.15 -7.2,-0.85 -6.6,-0.85 -6.6,2.15 6.6,2.15 6.6,-0.85 7.2,-0.85 7.2,-2.15 -7.2,-2.15
Top Courtyard:
  lines w0.05: -7.475,-2.425 -7.475,3.36 7.475,3.36 7.475,-2.425 -7.475,-2.425
Top Component Center:
  lines w0.1: -0.5,0 0.5,0 ; 0,-0.5 0,0.5
3D body "68711614522.stp": height 2.1, standoff 0, extent -7.2,-2.15 7.2,2.95

## 68711714522 [mm] "ZIF Connectors, Horizontal, Bottom Contact, pitch 0.5mm, 17p"
height 2.25
pads (19):
  rect 0.3x1.2 smd: 1(-4,2.56) 2(-3.5,2.56) 3(-3,2.56) 4(-2.5,2.56) 5(-2,2.56) 6(-1.5,2.56) 7(-1,2.56) 8(-0.5,2.56) 9(0,2.56) 10(0.5,2.56) 11(1,2.56) 12(1.5,2.56) 13(2,2.56) 14(2.5,2.56) 15(3,2.56) 16(3.5,2.56) 17(4,2.56)
  rect 2.7x3 smd: M1(-5.93,0.7) M2(5.93,0.7)
Top Overlay:
  circle w0.25: c-4.65,2.7 r0.125
  lines w0.2: -7.525,-1.125 -7.525,-2.225 7.525,-2.225 7.525,-1.125
Top Assembly:
  lines w0.1: -4.1,2.15 -4.1,2.95 -3.9,2.95 -3.9,2.15 ; -3.6,2.15 -3.6,2.95 -3.4,2.95 -3.4,2.15 ; -3.1,2.15 -3.1,2.95 -2.9,2.95 -2.9,2.15 ; -2.6,2.15 -2.6,2.95 -2.4,2.95 -2.4,2.15 ; -2.1,2.15 -2.1,2.95 -1.9,2.95 -1.9,2.15 ; -1.6,2.15 -1.6,2.95 -1.4,2.95 -1.4,2.15 ; -1.1,2.15 -1.1,2.95 -0.9,2.95 -0.9,2.15 ; -0.6,2.15 -0.6,2.95 -0.4,2.95 -0.4,2.15 ; -0.1,2.15 -0.1,2.95 0.1,2.95 0.1,2.15 ; 0.4,2.15 0.4,2.95 0.6,2.95 0.6,2.15 ; 0.9,2.15 0.9,2.95 1.1,2.95 1.1,2.15 ; 1.4,2.15 1.4,2.95 1.6,2.95 1.6,2.15 ; 1.9,2.15 1.9,2.95 2.1,2.95 2.1,2.15 ; 2.4,2.15 2.4,2.95 2.6,2.95 2.6,2.15 ; 2.9,2.15 2.9,2.95 3.1,2.95 3.1,2.15 ; 3.4,2.15 3.4,2.95 3.6,2.95 3.6,2.15 ; 3.9,2.15 3.9,2.95 4.1,2.95 4.1,2.15 ; -7.45,-2.15 -7.45,-0.85 -6.85,-0.85 -6.85,2.15 6.85,2.15 6.85,-0.85 7.45,-0.85 7.45,-2.15 -7.45,-2.15
Top Designator:
  text ".Designator" at -3.647,-0.357 h1
Top 3D Body:
  lines w0.1: -4.1,2.15 -4.1,2.95 -3.9,2.95 -3.9,2.15 ; -3.6,2.15 -3.6,2.95 -3.4,2.95 -3.4,2.15 ; -3.1,2.15 -3.1,2.95 -2.9,2.95 -2.9,2.15 ; -2.6,2.15 -2.6,2.95 -2.4,2.95 -2.4,2.15 ; -2.1,2.15 -2.1,2.95 -1.9,2.95 -1.9,2.15 ; -1.6,2.15 -1.6,2.95 -1.4,2.95 -1.4,2.15 ; -1.1,2.15 -1.1,2.95 -0.9,2.95 -0.9,2.15 ; -0.6,2.15 -0.6,2.95 -0.4,2.95 -0.4,2.15 ; -0.1,2.15 -0.1,2.95 0.1,2.95 0.1,2.15 ; 0.4,2.15 0.4,2.95 0.6,2.95 0.6,2.15 ; 0.9,2.15 0.9,2.95 1.1,2.95 1.1,2.15 ; 1.4,2.15 1.4,2.95 1.6,2.95 1.6,2.15 ; 1.9,2.15 1.9,2.95 2.1,2.95 2.1,2.15 ; 2.4,2.15 2.4,2.95 2.6,2.95 2.6,2.15 ; 2.9,2.15 2.9,2.95 3.1,2.95 3.1,2.15 ; 3.4,2.15 3.4,2.95 3.6,2.95 3.6,2.15 ; 3.9,2.15 3.9,2.95 4.1,2.95 4.1,2.15 ; -7.45,-2.15 7.45,-2.15 7.45,-0.85 6.85,-0.85 6.85,2.15 -6.85,2.15 -6.85,-0.85 -7.45,-0.85 -7.45,-2.15
Top Courtyard:
  lines w0.05: -7.725,-2.425 7.725,-2.425 7.725,3.36 -7.725,3.36 -7.725,-2.425
Top Component Center:
  lines w0.1: -0.5,0 0.5,0 ; 0,-0.5 0,0.5
3D body "68711714522.stp": height 2.1, standoff 0, extent -7.45,-2.15 7.45,2.95

## 68711814022 [mm] "ZIF Connectors, Horizontal, Top Contact, pitch 0.5mm, 18p"
height 2.25
pads (20):
  rect 0.3x1.2 smd: 1(-4.25,2.56) 2(-3.75,2.56) 3(-3.25,2.56) 4(-2.75,2.56) 5(-2.25,2.56) 6(-1.75,2.56) 7(-1.25,2.56) 8(-0.75,2.56) 9(-0.25,2.56) 10(0.25,2.56) 11(0.75,2.56) 12(1.25,2.56) 13(1.75,2.56) 14(2.25,2.56) 15(2.75,2.56) 16(3.25,2.56) 17(3.75,2.56) 18(4.25,2.56)
  rect 2.7x3 smd: M1(-6.18,0.7) M2(6.18,0.7)
Top Overlay:
  circle w0.25: c-4.95,2.8 r0.125
  lines w0.2: -7.775,-1.1 -7.775,-2.225 7.775,-2.225 7.775,-1.1
Top Assembly:
  lines w0.1: -4.35,2.15 -4.35,2.95 -4.15,2.95 -4.15,2.15 ; -3.85,2.15 -3.85,2.95 -3.65,2.95 -3.65,2.15 ; -3.35,2.15 -3.35,2.95 -3.15,2.95 -3.15,2.15 ; -2.85,2.15 -2.85,2.95 -2.65,2.95 -2.65,2.15 ; -2.35,2.15 -2.35,2.95 -2.15,2.95 -2.15,2.15 ; -1.85,2.15 -1.85,2.95 -1.65,2.95 -1.65,2.15 ; -1.35,2.15 -1.35,2.95 -1.15,2.95 -1.15,2.15 ; -0.85,2.15 -0.85,2.95 -0.65,2.95 -0.65,2.15 ; -0.35,2.15 -0.35,2.95 -0.15,2.95 -0.15,2.15 ; 0.15,2.15 0.15,2.95 0.35,2.95 0.35,2.15 ; 0.65,2.15 0.65,2.95 0.85,2.95 0.85,2.15 ; 1.15,2.15 1.15,2.95 1.35,2.95 1.35,2.15 ; 1.65,2.15 1.65,2.95 1.85,2.95 1.85,2.15 ; 2.15,2.15 2.15,2.95 2.35,2.95 2.35,2.15 ; 2.65,2.15 2.65,2.95 2.85,2.95 2.85,2.15 ; 3.15,2.15 3.15,2.95 3.35,2.95 3.35,2.15 ; 3.65,2.15 3.65,2.95 3.85,2.95 3.85,2.15 ; 4.15,2.15 4.15,2.95 4.35,2.95 4.35,2.15 ; -7.7,-2.15 -7.7,-0.85 -7.1,-0.85 -7.1,2.15 7.1,2.15 7.1,-0.85 7.7,-0.85 7.7,-2.15 -7.7,-2.15
Top Designator:
  text ".Designator" at -3.647,-0.357 h1
Top 3D Body:
  lines w0.1: -4.35,2.15 -4.35,2.95 -4.15,2.95 -4.15,2.15 ; -3.85,2.15 -3.85,2.95 -3.65,2.95 -3.65,2.15 ; -3.35,2.15 -3.35,2.95 -3.15,2.95 -3.15,2.15 ; -2.85,2.15 -2.85,2.95 -2.65,2.95 -2.65,2.15 ; -2.35,2.15 -2.35,2.95 -2.15,2.95 -2.15,2.15 ; -1.85,2.15 -1.85,2.95 -1.65,2.95 -1.65,2.15 ; -1.35,2.15 -1.35,2.95 -1.15,2.95 -1.15,2.15 ; -0.85,2.15 -0.85,2.95 -0.65,2.95 -0.65,2.15 ; -0.35,2.15 -0.35,2.95 -0.15,2.95 -0.15,2.15 ; 0.15,2.15 0.15,2.95 0.35,2.95 0.35,2.15 ; 0.65,2.15 0.65,2.95 0.85,2.95 0.85,2.15 ; 1.15,2.15 1.15,2.95 1.35,2.95 1.35,2.15 ; 1.65,2.15 1.65,2.95 1.85,2.95 1.85,2.15 ; 2.15,2.15 2.15,2.95 2.35,2.95 2.35,2.15 ; 2.65,2.15 2.65,2.95 2.85,2.95 2.85,2.15 ; 3.15,2.15 3.15,2.95 3.35,2.95 3.35,2.15 ; 3.65,2.15 3.65,2.95 3.85,2.95 3.85,2.15 ; 4.15,2.15 4.15,2.95 4.35,2.95 4.35,2.15 ; -7.7,-2.15 7.7,-2.15 7.7,-0.85 7.1,-0.85 7.1,2.15 -7.1,2.15 -7.1,-0.85 -7.7,-0.85 -7.7,-2.15
Top Courtyard:
  lines w0.05: -7.975,-2.425 -7.975,3.36 7.975,3.36 7.975,-2.425 -7.975,-2.425
Top Component Center:
  lines w0.1: -0.5,0 0.5,0 ; 0,-0.5 0,0.5
3D body "68711814022.stp": height 2.1, standoff 0, extent -7.7,-2.15 7.7,2.95

## 68711814522 [mm] "ZIF Connectors, Horizontal, Bottom Contact, pitch 0.5mm, 18p"
height 2.25
pads (20):
  rect 0.3x1.2 smd: 1(-4.25,2.56) 2(-3.75,2.56) 3(-3.25,2.56) 4(-2.75,2.56) 5(-2.25,2.56) 6(-1.75,2.56) 7(-1.25,2.56) 8(-0.75,2.56) 9(-0.25,2.56) 10(0.25,2.56) 11(0.75,2.56) 12(1.25,2.56) 13(1.75,2.56) 14(2.25,2.56) 15(2.75,2.56) 16(3.25,2.56) 17(3.75,2.56) 18(4.25,2.56)
  rect 2.7x3 smd: M1(-6.18,0.7) M2(6.18,0.7)
Top Overlay:
  circle w0.25: c-4.9,2.7 r0.125
  lines w0.2: -7.775,-1.125 -7.775,-2.225 7.775,-2.225 7.775,-1.125
Top Assembly:
  lines w0.1: -4.35,2.15 -4.35,2.95 -4.15,2.95 -4.15,2.15 ; -3.85,2.15 -3.85,2.95 -3.65,2.95 -3.65,2.15 ; -3.35,2.15 -3.35,2.95 -3.15,2.95 -3.15,2.15 ; -2.85,2.15 -2.85,2.95 -2.65,2.95 -2.65,2.15 ; -2.35,2.15 -2.35,2.95 -2.15,2.95 -2.15,2.15 ; -1.85,2.15 -1.85,2.95 -1.65,2.95 -1.65,2.15 ; -1.35,2.15 -1.35,2.95 -1.15,2.95 -1.15,2.15 ; -0.85,2.15 -0.85,2.95 -0.65,2.95 -0.65,2.15 ; -0.35,2.15 -0.35,2.95 -0.15,2.95 -0.15,2.15 ; 0.15,2.15 0.15,2.95 0.35,2.95 0.35,2.15 ; 0.65,2.15 0.65,2.95 0.85,2.95 0.85,2.15 ; 1.15,2.15 1.15,2.95 1.35,2.95 1.35,2.15 ; 1.65,2.15 1.65,2.95 1.85,2.95 1.85,2.15 ; 2.15,2.15 2.15,2.95 2.35,2.95 2.35,2.15 ; 2.65,2.15 2.65,2.95 2.85,2.95 2.85,2.15 ; 3.15,2.15 3.15,2.95 3.35,2.95 3.35,2.15 ; 3.65,2.15 3.65,2.95 3.85,2.95 3.85,2.15 ; 4.15,2.15 4.15,2.95 4.35,2.95 4.35,2.15 ; -7.7,-2.15 7.7,-2.15 7.7,-0.85 7.1,-0.85 7.1,2.15 -7.1,2.15 -7.1,-0.85 -7.7,-0.85 -7.7,-2.15
Top Designator:
  text ".Designator" at -3.647,-0.357 h1
Top 3D Body:
  lines w0.1: -4.35,2.15 -4.35,2.95 -4.15,2.95 -4.15,2.15 ; -3.85,2.15 -3.85,2.95 -3.65,2.95 -3.65,2.15 ; -3.35,2.15 -3.35,2.95 -3.15,2.95 -3.15,2.15 ; -2.85,2.15 -2.85,2.95 -2.65,2.95 -2.65,2.15 ; -2.35,2.15 -2.35,2.95 -2.15,2.95 -2.15,2.15 ; -1.85,2.15 -1.85,2.95 -1.65,2.95 -1.65,2.15 ; -1.35,2.15 -1.35,2.95 -1.15,2.95 -1.15,2.15 ; -0.85,2.15 -0.85,2.95 -0.65,2.95 -0.65,2.15 ; -0.35,2.15 -0.35,2.95 -0.15,2.95 -0.15,2.15 ; 0.15,2.15 0.15,2.95 0.35,2.95 0.35,2.15 ; 0.65,2.15 0.65,2.95 0.85,2.95 0.85,2.15 ; 1.15,2.15 1.15,2.95 1.35,2.95 1.35,2.15 ; 1.65,2.15 1.65,2.95 1.85,2.95 1.85,2.15 ; 2.15,2.15 2.15,2.95 2.35,2.95 2.35,2.15 ; 2.65,2.15 2.65,2.95 2.85,2.95 2.85,2.15 ; 3.15,2.15 3.15,2.95 3.35,2.95 3.35,2.15 ; 3.65,2.15 3.65,2.95 3.85,2.95 3.85,2.15 ; 4.15,2.15 4.15,2.95 4.35,2.95 4.35,2.15 ; -7.7,-2.15 -7.7,-0.85 -7.1,-0.85 -7.1,2.15 7.1,2.15 7.1,-0.85 7.7,-0.85 7.7,-2.15 -7.7,-2.15
Top Courtyard:
  lines w0.05: -7.975,-2.425 -7.975,3.36 7.975,3.36 7.975,-2.425 -7.975,-2.425
Top Component Center:
  lines w0.1: -0.5,0 0.5,0 ; 0,-0.5 0,0.5
3D body "68711814522.stp": height 2.1, standoff 0, extent -7.7,-2.15 7.7,2.95

## 68712014022 [mm] "ZIF Connectors, Horizontal, Top Contact, pitch 0.5mm, 20p"
height 2.25
pads (22):
  rect 0.3x1.2 smd: 1(-4.75,2.56) 2(-4.25,2.56) 3(-3.75,2.56) 4(-3.25,2.56) 5(-2.75,2.56) 6(-2.25,2.56) 7(-1.75,2.56) 8(-1.25,2.56) 9(-0.75,2.56) 10(-0.25,2.56) 11(0.25,2.56) 12(0.75,2.56) 13(1.25,2.56) 14(1.75,2.56) 15(2.25,2.56) 16(2.75,2.56) 17(3.25,2.56) 18(3.75,2.56) 19(4.25,2.56) 20(4.75,2.56)
  rect 2.7x3 smd: M1(-6.68,0.7) M2(6.68,0.7)
Top Overlay:
  circle w0.25: c-5.45,2.8 r0.125
  lines w0.2: -8.275,-1.1 -8.275,-2.225 8.275,-2.225 8.275,-1.1
Top Assembly:
  lines w0.1: -4.85,2.15 -4.85,2.95 -4.65,2.95 -4.65,2.15 ; -4.35,2.15 -4.35,2.95 -4.15,2.95 -4.15,2.15 ; -3.85,2.15 -3.85,2.95 -3.65,2.95 -3.65,2.15 ; -3.35,2.15 -3.35,2.95 -3.15,2.95 -3.15,2.15 ; -2.85,2.15 -2.85,2.95 -2.65,2.95 -2.65,2.15 ; -2.35,2.15 -2.35,2.95 -2.15,2.95 -2.15,2.15 ; -1.85,2.15 -1.85,2.95 -1.65,2.95 -1.65,2.15 ; -1.35,2.15 -1.35,2.95 -1.15,2.95 -1.15,2.15 ; -0.85,2.15 -0.85,2.95 -0.65,2.95 -0.65,2.15 ; -0.35,2.15 -0.35,2.95 -0.15,2.95 -0.15,2.15 ; 0.15,2.15 0.15,2.95 0.35,2.95 0.35,2.15 ; 0.65,2.15 0.65,2.95 0.85,2.95 0.85,2.15 ; 1.15,2.15 1.15,2.95 1.35,2.95 1.35,2.15 ; 1.65,2.15 1.65,2.95 1.85,2.95 1.85,2.15 ; 2.15,2.15 2.15,2.95 2.35,2.95 2.35,2.15 ; 2.65,2.15 2.65,2.95 2.85,2.95 2.85,2.15 ; 3.15,2.15 3.15,2.95 3.35,2.95 3.35,2.15 ; 3.65,2.15 3.65,2.95 3.85,2.95 3.85,2.15 ; 4.15,2.15 4.15,2.95 4.35,2.95 4.35,2.15 ; 4.65,2.15 4.65,2.95 4.85,2.95 4.85,2.15 ; -8.2,-2.15 8.2,-2.15 8.2,-0.85 7.6,-0.85 7.6,2.15 -7.6,2.15 -7.6,-0.85 -8.2,-0.85 -8.2,-2.15
Top Designator:
  text ".Designator" at -3.647,-0.357 h1
Top 3D Body:
  lines w0.1: -4.85,2.15 -4.85,2.95 -4.65,2.95 -4.65,2.15 ; -4.35,2.15 -4.35,2.95 -4.15,2.95 -4.15,2.15 ; -3.85,2.15 -3.85,2.95 -3.65,2.95 -3.65,2.15 ; -3.35,2.15 -3.35,2.95 -3.15,2.95 -3.15,2.15 ; -2.85,2.15 -2.85,2.95 -2.65,2.95 -2.65,2.15 ; -2.35,2.15 -2.35,2.95 -2.15,2.95 -2.15,2.15 ; -1.85,2.15 -1.85,2.95 -1.65,2.95 -1.65,2.15 ; -1.35,2.15 -1.35,2.95 -1.15,2.95 -1.15,2.15 ; -0.85,2.15 -0.85,2.95 -0.65,2.95 -0.65,2.15 ; -0.35,2.15 -0.35,2.95 -0.15,2.95 -0.15,2.15 ; 0.15,2.15 0.15,2.95 0.35,2.95 0.35,2.15 ; 0.65,2.15 0.65,2.95 0.85,2.95 0.85,2.15 ; 1.15,2.15 1.15,2.95 1.35,2.95 1.35,2.15 ; 1.65,2.15 1.65,2.95 1.85,2.95 1.85,2.15 ; 2.15,2.15 2.15,2.95 2.35,2.95 2.35,2.15 ; 2.65,2.15 2.65,2.95 2.85,2.95 2.85,2.15 ; 3.15,2.15 3.15,2.95 3.35,2.95 3.35,2.15 ; 3.65,2.15 3.65,2.95 3.85,2.95 3.85,2.15 ; 4.15,2.15 4.15,2.95 4.35,2.95 4.35,2.15 ; 4.65,2.15 4.65,2.95 4.85,2.95 4.85,2.15 ; -8.2,-2.15 -8.2,-0.85 -7.6,-0.85 -7.6,2.15 7.6,2.15 7.6,-0.85 8.2,-0.85 8.2,-2.15 -8.2,-2.15
Top Courtyard:
  lines w0.05: -8.475,-2.425 8.475,-2.425 8.475,3.36 -8.475,3.36 -8.475,-2.425
Top Component Center:
  lines w0.1: -0.5,0 0.5,0 ; 0,-0.5 0,0.5
3D body "68712014022.stp": height 2.1, standoff 0, extent -8.2,-2.15 8.2,2.95